# Altium footprint library airsense_lib.PcbLib: 7 footprints
Each footprint in its own frame and in the unit in brackets; x right, y up, seen from the top. Pads: shape width x height; smd on the part's side, far side on the other; paste and mask are expansions set on the pad; w line width, h text height; cw(c..) or ccw(c..) is an arc to the next point about the centre after c.
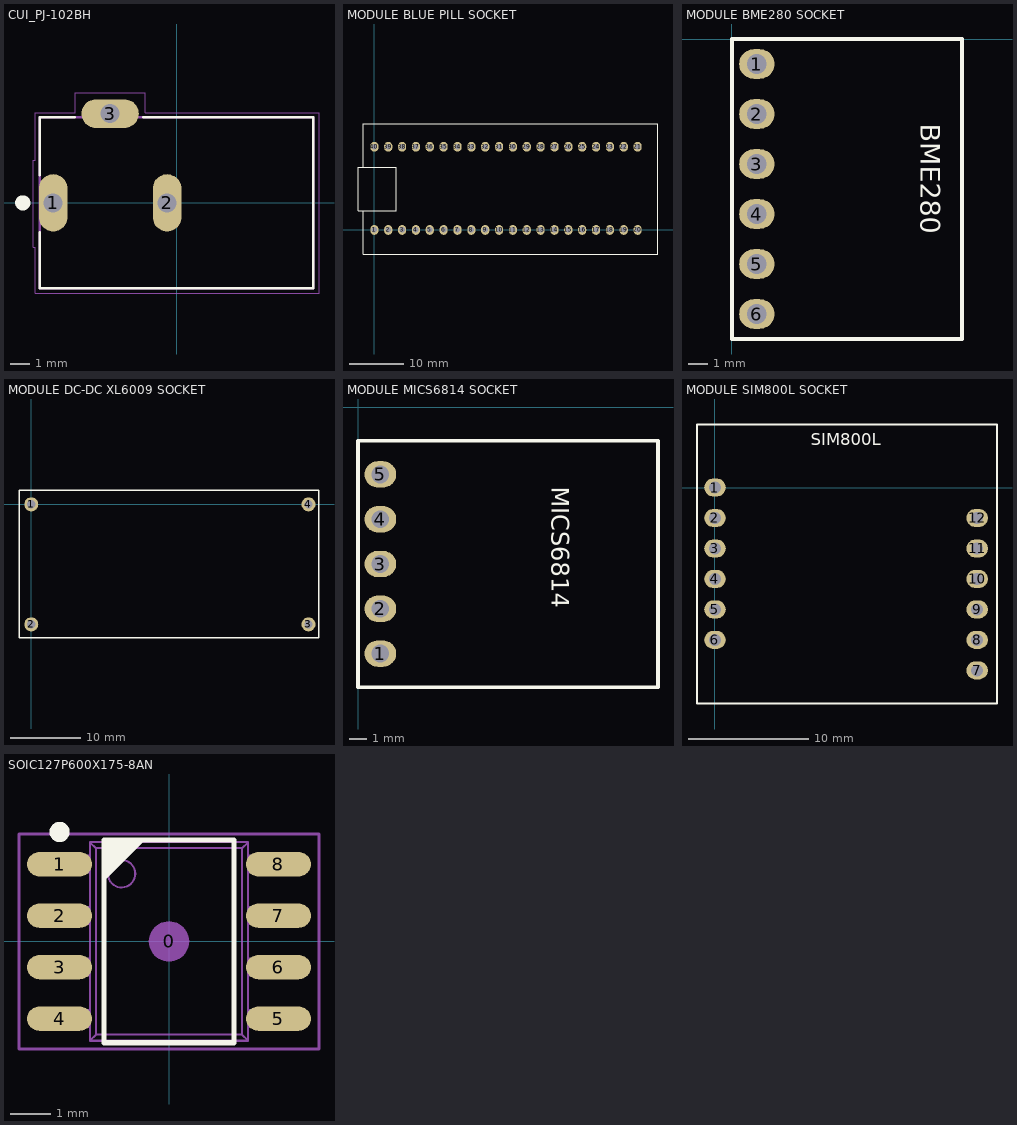
[diagram p0: the footprints below, top view; thin cyan lines are the x and y axes]

## CUI_PJ-102BH [mm]
pads (3):
  oval 1.508x3.016 hole 1: 1(-6.5,0) 2(-0.5,0)
  oval 3.016x1.508 hole 1: 3(-3.5,4.7)
Top Overlay:
  circle w0.4: c-8.1,0 r0.2
  lines w0.127: -7.2,-1.55 -7.2,-4.5 7.2,-4.5 7.2,4.5 -1.75,4.5 ; -7.2,1.45 -7.2,4.5 -5.35,4.5
Mechanical 1:
  lines w0: -7,-0.8 -7,0.8 -6,0.8 -6,-0.8 -7,-0.8 ; -4.3,4.2 -2.7,4.2 -2.7,5.2 -4.3,5.2 -4.3,4.2 ; -1,-0.8 -1,0.8 0,0.8 0,-0.8 -1,-0.8
Mechanical 4:
  lines w0.127: -7.2,-4.5 -7.2,4.5 ; -7.2,-4.5 7.2,-4.5 ; -7.2,-4.5 -7.2,4.5 ; -7.2,-4.5 7.2,-4.5 ; -7.2,4.5 7.2,4.5 ; -7.2,4.5 7.2,4.5 ; 7.2,-4.5 7.2,4.5 ; 7.2,-4.5 7.2,4.5
Mechanical 16:
  lines w0.05: -7.55,-2.35 -7.45,-2.35 -7.45,-4.75 7.5,-4.75 7.5,4.75 -1.65,4.75 -1.65,5.8 -5.35,5.8 -5.35,4.75 -7.45,4.75 -7.45,2.25 -7.55,2.25 -7.55,-2.35
3D body "CUI_PJ-102BH.step": height 11.5, standoff -3, extent -7.2,-4.5 7.2,4.9

## MODULE BLUE PILL SOCKET [mm]
pads (40):
  oval 1.5x1.8 hole 1: 1(0,0) 2(2.54,0) 3(5.08,0) 4(7.62,0) 5(10.16,0) 6(12.7,0) 7(15.24,0) 8(17.78,0) 9(20.32,0) 10(22.86,0) 11(25.4,0) 12(27.94,0) 13(30.48,0) 14(33.02,0) 15(35.56,0) 16(38.1,0) 17(40.64,0) 18(43.18,0) 19(45.72,0) 20(48.26,0) 21(48.26,15.24) 22(45.72,15.24) 23(43.18,15.24) 24(40.64,15.24) 25(38.1,15.24) 26(35.56,15.24) 27(33.02,15.24) 28(30.48,15.24) 29(27.94,15.24) 30(25.4,15.24) 31(22.86,15.24) 32(20.32,15.24) 33(17.78,15.24) 34(15.24,15.24) 35(12.7,15.24) 36(10.16,15.24) 37(7.62,15.24) 38(5.08,15.24) 39(2.54,15.24) 40(0,15.24)
Top Overlay:
  lines w0.2: -2,3.5 -2,-4.5 52,-4.5 52,19.5 -2,19.5 -2,11.5 ; -2,3.5 1,3.5 4,3.5 4,11.5 -2,11.5 ; -2,3.5 -3,3.5 -3,11.5 -2,11.5
3D body "STM32F103C8T6_Blue_Pill v6.step": height 20.77, standoff 2.5, extent -3.43,-3.81 54.13,19.05
3D body "female_header_a-bl254-eg-g20d.stp": height 8.5, standoff -3.2, extent -1.395,13.99 49.655,16.49
3D body "female_header_a-bl254-eg-g20d.stp": height 8.5, standoff -3.2, extent -1.395,-1.25 49.655,1.25

## MODULE BME280 SOCKET [mm]
pads (6):
  oval 1.8x1.5 hole 1: 1(1.27,-1.27) 2(1.27,-3.81) 3(1.27,-6.35) 4(1.27,-8.89) 5(1.27,-11.43) 6(1.27,-13.97)
Top Overlay:
  lines w0.2: 0,-15.24 0,0 11.7,0 11.7,-15.24 0,-15.24
  text "BME280" at 9.6,-4.3 h1
3D body "female_header_a-bl254-eg-g06d.stp": height 8.5, standoff -3.2, extent 0.02,-15.365 2.52,0.125
3D body "Module_bme280_3.step": height 14.1, standoff 2.9, extent 0,-15.42 11.5,-0.08

## MODULE DC-DC XL6009 SOCKET [mm]
height 10
pads (4):
  round 2 hole 1.2: 1(0,0) 2(0,-17.1) 3(39.5,-17.1) 4(39.5,0)
Top Overlay:
  lines w0.2: -1.75,-19 -1.75,2 41,2 41,-19 -1.75,-19
3D body "Pin Header 1x1 TH Pitch 2.54mm.stp": height 11.7, standoff -1, extent -1.27,-18.37 1.27,-15.83
3D body "Pin Header 1x1 TH Pitch 2.54mm.stp": height 11.7, standoff -1, extent 38.23,-1.27 40.77,1.27
3D body "Pin Header 1x1 TH Pitch 2.54mm.stp": height 11.7, standoff -1, extent 38.227,-18.415 40.767,-15.875
3D body "Pin Header 1x1 TH Pitch 2.54mm.stp": height 11.7, standoff -1, extent -1.27,-1.27 1.27,1.27
3D body "XL6009.stp": height 21.25, standoff 3.29, extent -1.81,-19.113 41.37,1.968

## MODULE MICS6814 SOCKET [mm] "GAS SENSOR BREAKOUT BOARD"
height 12
pads (5):
  oval 1.8x1.5 hole 1: 1(1.27,-13.97) 2(1.27,-11.43) 3(1.27,-8.89) 4(1.27,-6.35) 5(1.27,-3.81)
Top Overlay:
  lines w0.2: 0,-15.89 17.02,-15.89 17.02,-1.89 0,-1.89 0,-15.89
  text "MICS6814" at 11,-4.5 h1
3D body "female_header_a-bl254-eg-g05d.stp": height 8.5, standoff -3.2, extent 0.02,-15.365 2.52,-2.415
3D body "module_mics6814.step": height 14.1, standoff 2.9, extent 0.02,-15.89 17.02,-1.89

## MODULE SIM800L SOCKET [mm] "GSM GRPS MODULE BREAKOUT BOARD"
height 12
pads (12):
  oval 1.8x1.5 hole 1: 1(0,0) 2(0,-2.54) 3(0,-5.08) 4(0,-7.62) 5(0,-10.16) 6(0,-12.7) 7(21.844,-15.24) 8(21.844,-12.7) 9(21.844,-10.16) 10(21.844,-7.62) 11(21.844,-5.08) 12(21.844,-2.54)
Top Overlay:
  lines w0.2: -1.5,-18 23.5,-18 23.5,5 23.5,5.25 -1.5,5.25 -1.5,-18
  text "SIM800L" at 8,3.5 h1
3D body "female_header_a-bl254-eg-g06d.stp": height 8.5, standoff -3.2, extent 20.594,-16.635 23.094,-1.145
3D body "female_header_a-bl254-eg-g06d.stp": height 8.5, standoff -3.2, extent -1.25,-14.095 1.25,1.395
3D body "module_sim800l.step": height 15.6, standoff 3.1, extent -1.512,-17.942 23.488,5.192

## SOIC127P600X175-8AN [mm]
pads (9):
  round 1 on Mech15: 0(0,0)
  oval 1.6x0.6 smd: 1(-2.7,1.905) 2(-2.7,0.635) 3(-2.7,-0.635) 4(-2.7,-1.905) 5(2.7,-1.905) 6(2.7,-0.635) 7(2.7,0.635) 8(2.7,1.905)
Top Overlay:
  circle w0.25: c-2.7,2.7 r0.125
  region: -1.6,2.5 -0.6,2.5 -1.6,1.5
  lines w0.127: -1.6,-2.5 1.6,-2.5 1.6,2.5 -1.6,2.5 -1.6,-2.5
Mechanical 13:
  circle w0.05: c-1.17,1.67 r0.338
  lines w0.05: -2.631,-2.115 -2.631,-1.695 ; -2.631,-0.845 -2.631,-0.425 ; -2.631,0.425 -2.631,0.845 ; -2.631,1.695 -2.631,2.115 ; -2.543,-2.115 -2.543,-1.695 ; -2.543,-0.845 -2.543,-0.425 ; -2.543,0.425 -2.543,0.845 ; -2.543,1.695 -2.543,2.115 ; -2.403,-2.115 -2.403,-1.695 ; -2.403,-0.845 -2.403,-0.425 ; -2.403,0.425 -2.403,0.845 ; -2.403,1.695 -2.403,2.115 ; -2.113,-2.115 -2.113,-1.695 ; -2.113,-0.845 -2.113,-0.425 ; -2.113,0.425 -2.113,0.845 ; -2.113,1.695 -2.113,2.115 ; -1.95,-2.115 -3,-2.115 -3,-1.695 -1.95,-1.695 ; -1.95,-0.845 -3,-0.845 -3,-0.425 -1.95,-0.425 ; -1.95,0.425 -3,0.425 -3,0.845 -1.95,0.845 ; -1.95,1.695 -3,1.695 -3,2.115 -1.95,2.115 ; 1.95,-2.115 3,-2.115 3,-1.695 1.95,-1.695 ; 1.95,-0.845 3,-0.845 3,-0.425 1.95,-0.425 ; 1.95,0.425 3,0.425 3,0.845 1.95,0.845 ; 1.95,1.695 3,1.695 3,2.115 1.95,2.115 ; 2.113,-2.115 2.113,-1.695 ; 2.113,-0.845 2.113,-0.425 ; 2.113,0.425 2.113,0.845 ; 2.113,1.695 2.113,2.115 ; 2.403,-2.115 2.403,-1.695 ; 2.403,-0.845 2.403,-0.425 ; 2.403,0.425 2.403,0.845 ; 2.403,1.695 2.403,2.115 ; 2.543,-2.115 2.543,-1.695 ; 2.543,-0.845 2.543,-0.425 ; 2.543,0.425 2.543,0.845 ; 2.543,1.695 2.543,2.115 ; 2.631,-2.115 2.631,-1.695 ; 2.631,-0.845 2.631,-0.425 ; 2.631,0.425 2.631,0.845 ; 2.631,1.695 2.631,2.115 ; -1.95,-2.45 -1.801,-2.301 ; -1.95,-2.45 -1.95,2.45 ; -1.95,-2.45 1.95,-2.45 ; -1.95,2.45 1.95,2.45 ; -1.95,2.45 -1.801,2.301 ; -1.801,-2.301 -1.801,2.301 ; -1.801,-2.301 1.801,-2.301 ; -1.801,2.301 1.801,2.301 ; 1.801,-2.301 1.801,2.301 ; 1.801,-2.301 1.95,-2.45 ; 1.801,2.301 1.95,2.45 ; 1.95,-2.45 1.95,2.45
Mechanical 15:
  lines w0.076: -3.7,-2.65 3.7,-2.65 3.7,2.65 -3.7,2.65 -3.7,-2.65
3D body "SOIC-8.STEP": height 1.75, standoff 0, extent -3,-2.45 3,2.45